# Altium footprint library Connector Header 254 Right Angel.PcbLib: 49 footprints (part 1 of 4)
Each footprint in its own frame and in the unit in brackets; x right, y up, seen from the top. Pads: shape width x height; smd on the part's side, far side on the other; paste and mask are expansions set on the pad; w line width, h text height; cw(c..) or ccw(c..) is an arc to the next point about the centre after c.
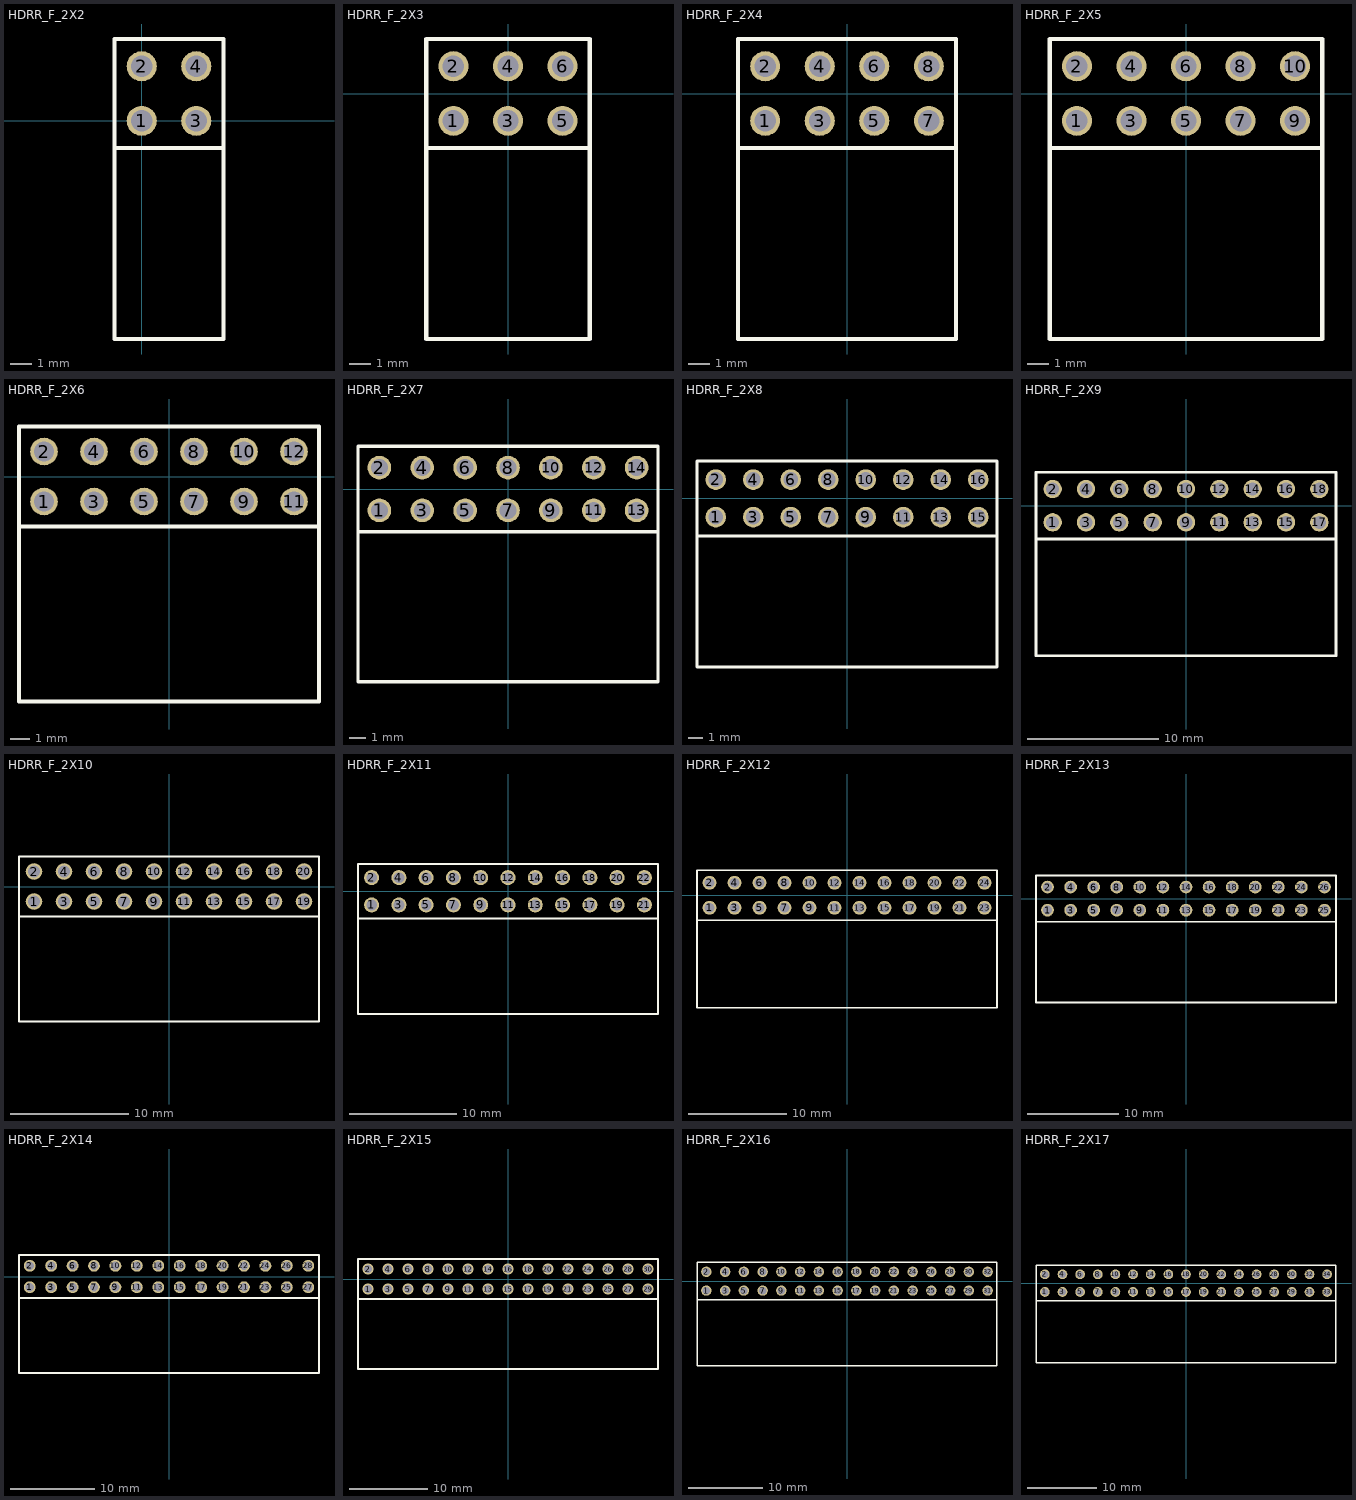
[diagram p0: the footprints below, top view; thin cyan lines are the x and y axes]

## HDRR_F_2X2 [mm] "Connector; Header; 2x2 Position"
height 5
pads (4):
  round 1.4 / inner round 1.4 / far side oval 1.4x2.2 hole 1: 1(0,0) 2(0,2.54) 3(2.54,0) 4(2.54,2.54)
Top Overlay:
  lines w0.2: -1.27,-1.27 -1.27,-10.16 3.81,-10.16 3.81,-1.27 ; -1.27,-1.27 3.81,-1.27 ; -1.27,-1.27 -1.27,3.81 3.81,3.81 3.81,-1.27
3D body "PBD-4R.step": height 5, standoff -3, extent -1.27,-10.16 3.81,2.84

## HDRR_F_2X3 [mm] "Connector; Header; 3x2 Position"
height 5
pads (6):
  round 1.4 / inner round 1.4 / far side oval 1.4x2.2 hole 1: 1(-2.54,-1.27) 2(-2.54,1.27) 3(0,-1.27) 4(0,1.27) 5(2.54,-1.27) 6(2.54,1.27)
Top Overlay:
  lines w0.2: -3.81,-2.54 -3.81,-11.43 3.81,-11.43 3.81,-2.54 ; -3.81,-2.54 -3.81,2.54 3.81,2.54 3.81,-2.54 ; -3.81,-2.54 3.81,-2.54
3D body "PBD-6R.step": height 5, standoff -3, extent -3.81,-11.43 3.81,1.57

## HDRR_F_2X4 [mm] "Connector; Header; 4x2 Position"
height 5
pads (8):
  round 1.4 / inner round 1.4 / far side oval 1.4x2.2 hole 1: 1(-3.81,-1.27) 2(-3.81,1.27) 3(-1.27,-1.27) 4(-1.27,1.27) 5(1.27,-1.27) 6(1.27,1.27) 7(3.81,-1.27) 8(3.81,1.27)
Top Overlay:
  lines w0.2: -5.08,-2.54 -5.08,-11.43 5.08,-11.43 5.08,-2.54 ; -5.08,-2.54 -5.08,2.54 5.08,2.54 5.08,-2.54 ; -5.08,-2.54 5.08,-2.54
3D body "PBD-8R.step": height 5, standoff -3, extent -5.08,-11.43 5.08,1.57

## HDRR_F_2X5 [mm] "Connector; Header; 5x2 Position"
height 5
pads (10):
  round 1.4 / inner round 1.4 / far side oval 1.4x2.2 hole 1: 1(-5.08,-1.27) 2(-5.08,1.27) 3(-2.54,-1.27) 4(-2.54,1.27) 5(0,-1.27) 6(0,1.27) 7(2.54,-1.27) 8(2.54,1.27) 9(5.08,-1.27) 10(5.08,1.27)
Top Overlay:
  lines w0.2: -6.35,-2.54 -6.35,2.54 6.35,2.54 6.35,-2.54 ; -6.35,-2.54 6.35,-2.54 ; -6.35,-2.54 -6.35,-11.43 6.35,-11.43 6.35,-2.54
3D body "PBD-10R.step": height 5, standoff -3, extent -6.35,-11.43 6.35,1.57

## HDRR_F_2X6 [mm] "Connector; Header; 6x2 Position"
height 5
pads (12):
  round 1.4 / inner round 1.4 / far side oval 1.4x2.2 hole 1: 1(-6.35,-1.27) 2(-6.35,1.27) 3(-3.81,-1.27) 4(-3.81,1.27) 5(-1.27,-1.27) 6(-1.27,1.27) 7(1.27,-1.27) 8(1.27,1.27) 9(3.81,-1.27) 10(3.81,1.27) 11(6.35,-1.27) 12(6.35,1.27)
Top Overlay:
  lines w0.2: -7.62,-2.54 -7.62,2.54 7.62,2.54 7.62,-2.54 ; -7.62,-2.54 7.62,-2.54 ; -7.62,-2.54 -7.62,-11.43 7.62,-11.43 7.62,-2.54
3D body "PBD-12R.step": height 5, standoff -3, extent -7.62,-11.43 7.62,1.57

## HDRR_F_2X7 [mm] "Connector; Header; 7x2 Position"
height 5
pads (14):
  round 1.4 / inner round 1.4 / far side oval 1.4x2.2 hole 1: 1(-7.62,-1.27) 2(-7.62,1.27) 3(-5.08,-1.27) 4(-5.08,1.27) 5(-2.54,-1.27) 6(-2.54,1.27) 7(0,-1.27) 8(0,1.27) 9(2.54,-1.27) 10(2.54,1.27) 11(5.08,-1.27) 12(5.08,1.27) 13(7.62,-1.27) 14(7.62,1.27)
Top Overlay:
  lines w0.2: -8.89,-2.54 -8.89,-11.43 8.89,-11.43 8.89,-2.54 ; -8.89,-2.54 8.89,-2.54 ; -8.89,-2.54 -8.89,2.54 8.89,2.54 8.89,-2.54
3D body "PBD-14R.step": height 5, standoff -3, extent -8.89,-11.43 8.89,1.57

## HDRR_F_2X8 [mm] "Connector; Header; 8x2 Position"
height 5
pads (16):
  round 1.4 / inner round 1.4 / far side oval 1.4x2.2 hole 1: 1(-8.89,-1.27) 2(-8.89,1.27) 3(-6.35,-1.27) 4(-6.35,1.27) 5(-3.81,-1.27) 6(-3.81,1.27) 7(-1.27,-1.27) 8(-1.27,1.27) 9(1.27,-1.27) 10(1.27,1.27) 11(3.81,-1.27) 12(3.81,1.27) 13(6.35,-1.27) 14(6.35,1.27) 15(8.89,-1.27) 16(8.89,1.27)
Top Overlay:
  lines w0.2: -10.16,-2.54 -10.16,-11.43 10.16,-11.43 10.16,-2.54 ; -10.16,-2.54 10.16,-2.54 ; -10.16,-2.54 -10.16,2.54 10.16,2.54 10.16,-2.54
3D body "PBD-16R.step": height 5, standoff -3, extent -10.16,-11.43 10.16,1.57

## HDRR_F_2X9 [mm] "Connector; Header; 9x2 Position"
height 5
pads (18):
  round 1.4 / inner round 1.4 / far side oval 1.4x2.2 hole 1: 1(-10.16,-1.27) 2(-10.16,1.27) 3(-7.62,-1.27) 4(-7.62,1.27) 5(-5.08,-1.27) 6(-5.08,1.27) 7(-2.54,-1.27) 8(-2.54,1.27) 9(0,-1.27) 10(0,1.27) 11(2.54,-1.27) 12(2.54,1.27) 13(5.08,-1.27) 14(5.08,1.27) 15(7.62,-1.27) 16(7.62,1.27) 17(10.16,-1.27) 18(10.16,1.27)
Top Overlay:
  lines w0.2: -11.43,-2.54 -11.43,-11.43 11.43,-11.43 11.43,-2.54 ; -11.43,-2.54 11.43,-2.54 ; -11.43,-2.54 -11.43,2.54 11.43,2.54 11.43,-2.54
3D body "PBD-18R.step": height 5, standoff -3, extent -11.43,-11.43 11.43,1.57

## HDRR_F_2X10 [mm] "Connector; Header; 10x2 Position"
height 5
pads (20):
  round 1.4 / inner round 1.4 / far side oval 1.4x2.2 hole 1: 1(-11.43,-1.27) 2(-11.43,1.27) 3(-8.89,-1.27) 4(-8.89,1.27) 5(-6.35,-1.27) 6(-6.35,1.27) 7(-3.81,-1.27) 8(-3.81,1.27) 9(-1.27,-1.27) 10(-1.27,1.27) 11(1.27,-1.27) 12(1.27,1.27) 13(3.81,-1.27) 14(3.81,1.27) 15(6.35,-1.27) 16(6.35,1.27) 17(8.89,-1.27) 18(8.89,1.27) 19(11.43,-1.27) 20(11.43,1.27)
Top Overlay:
  lines w0.2: -12.7,-2.54 -12.7,2.54 12.7,2.54 12.7,-2.54 ; -12.7,-2.54 12.7,-2.54 ; -12.7,-2.54 -12.7,-11.43 12.7,-11.43 12.7,-2.54
3D body "PBD-20R.step": height 5, standoff -3, extent -12.7,-11.43 12.7,1.57

## HDRR_F_2X11 [mm] "Connector; Header; 11x2 Position"
height 5
pads (22):
  round 1.4 / inner round 1.4 / far side oval 1.4x2.2 hole 1: 1(-12.7,-1.27) 2(-12.7,1.27) 3(-10.16,-1.27) 4(-10.16,1.27) 5(-7.62,-1.27) 6(-7.62,1.27) 7(-5.08,-1.27) 8(-5.08,1.27) 9(-2.54,-1.27) 10(-2.54,1.27) 11(0,-1.27) 12(0,1.27) 13(2.54,-1.27) 14(2.54,1.27) 15(5.08,-1.27) 16(5.08,1.27) 17(7.62,-1.27) 18(7.62,1.27) 19(10.16,-1.27) 20(10.16,1.27) 21(12.7,-1.27) 22(12.7,1.27)
Top Overlay:
  lines w0.2: -13.97,-2.54 -13.97,-11.43 13.97,-11.43 13.97,-2.54 ; -13.97,-2.54 13.97,-2.54 ; -13.97,-2.54 -13.97,2.54 13.97,2.54 13.97,-2.54
3D body "PBD-22R.step": height 5, standoff -3, extent -13.97,-11.43 13.97,1.57

## HDRR_F_2X12 [mm] "Connector; Header; 12x2 Position"
height 5
pads (24):
  round 1.4 / inner round 1.4 / far side oval 1.4x2.2 hole 1: 1(-13.97,-1.27) 2(-13.97,1.27) 3(-11.43,-1.27) 4(-11.43,1.27) 5(-8.89,-1.27) 6(-8.89,1.27) 7(-6.35,-1.27) 8(-6.35,1.27) 9(-3.81,-1.27) 10(-3.81,1.27) 11(-1.27,-1.27) 12(-1.27,1.27) 13(1.27,-1.27) 14(1.27,1.27) 15(3.81,-1.27) 16(3.81,1.27) 17(6.35,-1.27) 18(6.35,1.27) 19(8.89,-1.27) 20(8.89,1.27) 21(11.43,-1.27) 22(11.43,1.27) 23(13.97,-1.27) 24(13.97,1.27)
Top Overlay:
  lines w0.2: -15.24,-2.54 15.24,-2.54 ; -15.24,-2.54 -15.24,2.54 15.24,2.54 15.24,-2.54 ; -15.24,-2.54 -15.24,-11.43 15.24,-11.43 15.24,-2.54
3D body "PBD-24R.step": height 5, standoff -3, extent -15.24,-11.43 15.24,1.57

## HDRR_F_2X13 [mm] "Connector; Header; 13x2 Position"
height 5
pads (26):
  round 1.4 / inner round 1.4 / far side oval 1.4x2.2 hole 1: 1(-15.24,-1.27) 2(-15.24,1.27) 3(-12.7,-1.27) 4(-12.7,1.27) 5(-10.16,-1.27) 6(-10.16,1.27) 7(-7.62,-1.27) 8(-7.62,1.27) 9(-5.08,-1.27) 10(-5.08,1.27) 11(-2.54,-1.27) 12(-2.54,1.27) 13(0,-1.27) 14(0,1.27) 15(2.54,-1.27) 16(2.54,1.27) 17(5.08,-1.27) 18(5.08,1.27) 19(7.62,-1.27) 20(7.62,1.27) 21(10.16,-1.27) 22(10.16,1.27) 23(12.7,-1.27) 24(12.7,1.27) 25(15.24,-1.27) 26(15.24,1.27)
Top Overlay:
  lines w0.2: -16.51,-2.54 16.51,-2.54 ; -16.51,-2.54 -16.51,2.54 16.51,2.54 16.51,-2.54 ; -16.51,-2.54 -16.51,-11.43 16.51,-11.43 16.51,-2.54
3D body "PBD-26R.step": height 5, standoff -3, extent -16.51,-11.43 16.51,1.57

## HDRR_F_2X14 [mm] "Connector; Header; 14x2 Position"
height 5
pads (28):
  round 1.4 / inner round 1.4 / far side oval 1.4x2.2 hole 1: 1(-16.51,-1.27) 2(-16.51,1.27) 3(-13.97,-1.27) 4(-13.97,1.27) 5(-11.43,-1.27) 6(-11.43,1.27) 7(-8.89,-1.27) 8(-8.89,1.27) 9(-6.35,-1.27) 10(-6.35,1.27) 11(-3.81,-1.27) 12(-3.81,1.27) 13(-1.27,-1.27) 14(-1.27,1.27) 15(1.27,-1.27) 16(1.27,1.27) 17(3.81,-1.27) 18(3.81,1.27) 19(6.35,-1.27) 20(6.35,1.27) 21(8.89,-1.27) 22(8.89,1.27) 23(11.43,-1.27) 24(11.43,1.27) 25(13.97,-1.27) 26(13.97,1.27) 27(16.51,-1.27) 28(16.51,1.27)
Top Overlay:
  lines w0.2: -17.78,-2.54 17.78,-2.54 ; -17.78,-2.54 -17.78,2.54 17.78,2.54 17.78,-2.54 ; -17.78,-2.54 -17.78,-11.43 17.78,-11.43 17.78,-2.54
3D body "PBD-28R.step": height 5, standoff -3, extent -17.78,-11.43 17.78,1.57

## HDRR_F_2X15 [mm] "Connector; Header; 15x2 Position"
height 5
pads (30):
  round 1.4 / inner round 1.4 / far side oval 1.4x2.2 hole 1: 1(-17.78,-1.27) 2(-17.78,1.27) 3(-15.24,-1.27) 4(-15.24,1.27) 5(-12.7,-1.27) 6(-12.7,1.27) 7(-10.16,-1.27) 8(-10.16,1.27) 9(-7.62,-1.27) 10(-7.62,1.27) 11(-5.08,-1.27) 12(-5.08,1.27) 13(-2.54,-1.27) 14(-2.54,1.27) 15(0,-1.27) 16(0,1.27) 17(2.54,-1.27) 18(2.54,1.27) 19(5.08,-1.27) 20(5.08,1.27) 21(7.62,-1.27) 22(7.62,1.27) 23(10.16,-1.27) 24(10.16,1.27) 25(12.7,-1.27) 26(12.7,1.27) 27(15.24,-1.27) 28(15.24,1.27) 29(17.78,-1.27) 30(17.78,1.27)
Top Overlay:
  lines w0.2: -19.05,-2.54 -19.05,-11.43 19.05,-11.43 19.05,-2.54 ; -19.05,-2.54 19.05,-2.54 ; -19.05,-2.54 -19.05,2.54 19.05,2.54 19.05,-2.54
3D body "PBD-30R.step": height 5, standoff -3, extent -19.05,-11.43 19.05,1.57

## HDRR_F_2X16 [mm] "Connector; Header; 16x2 Position"
height 5
pads (32):
  round 1.4 / inner round 1.4 / far side oval 1.4x2.2 hole 1: 1(-19.05,-1.27) 2(-19.05,1.27) 3(-16.51,-1.27) 4(-16.51,1.27) 5(-13.97,-1.27) 6(-13.97,1.27) 7(-11.43,-1.27) 8(-11.43,1.27) 9(-8.89,-1.27) 10(-8.89,1.27) 11(-6.35,-1.27) 12(-6.35,1.27) 13(-3.81,-1.27) 14(-3.81,1.27) 15(-1.27,-1.27) 16(-1.27,1.27) 17(1.27,-1.27) 18(1.27,1.27) 19(3.81,-1.27) 20(3.81,1.27) 21(6.35,-1.27) 22(6.35,1.27) 23(8.89,-1.27) 24(8.89,1.27) 25(11.43,-1.27) 26(11.43,1.27) 27(13.97,-1.27) 28(13.97,1.27) 29(16.51,-1.27) 30(16.51,1.27) 31(19.05,-1.27) 32(19.05,1.27)
Top Overlay:
  lines w0.2: -20.32,-2.54 -20.32,2.54 20.32,2.54 20.32,-2.54 ; -20.32,-2.54 20.32,-2.54 ; -20.32,-2.54 -20.32,-11.43 20.32,-11.43 20.32,-2.54
3D body "PBD-32R.step": height 5, standoff -3, extent -20.32,-11.43 20.32,1.57

## HDRR_F_2X17 [mm] "Connector; Header; 17x2 Position"
height 5
pads (34):
  round 1.4 / inner round 1.4 / far side oval 1.4x2.2 hole 1: 1(-20.32,-1.27) 2(-20.32,1.27) 3(-17.78,-1.27) 4(-17.78,1.27) 5(-15.24,-1.27) 6(-15.24,1.27) 7(-12.7,-1.27) 8(-12.7,1.27) 9(-10.16,-1.27) 10(-10.16,1.27) 11(-7.62,-1.27) 12(-7.62,1.27) 13(-5.08,-1.27) 14(-5.08,1.27) 15(-2.54,-1.27) 16(-2.54,1.27) 17(0,-1.27) 18(0,1.27) 19(2.54,-1.27) 20(2.54,1.27) 21(5.08,-1.27) 22(5.08,1.27) 23(7.62,-1.27) 24(7.62,1.27) 25(10.16,-1.27) 26(10.16,1.27) 27(12.7,-1.27) 28(12.7,1.27) 29(15.24,-1.27) 30(15.24,1.27) 31(17.78,-1.27) 32(17.78,1.27) 33(20.32,-1.27) 34(20.32,1.27)
Top Overlay:
  lines w0.2: -21.59,-2.54 -21.59,2.54 21.59,2.54 21.59,-2.54 ; -21.59,-2.54 21.59,-2.54 ; -21.59,-2.54 -21.59,-11.43 21.59,-11.43 21.59,-2.54
3D body "PBD-34R.step": height 5, standoff -3, extent -21.59,-11.43 21.59,1.57